# Altium footprint library Miscellaneous Connectors.PcbLib: 245 footprints (part 4 of 16)
Each footprint in its own frame and in the unit in brackets; x right, y up, seen from the top. Pads: shape width x height; smd on the part's side, far side on the other; paste and mask are expansions set on the pad; w line width, h text height; cw(c..) or ccw(c..) is an arc to the next point about the centre after c.
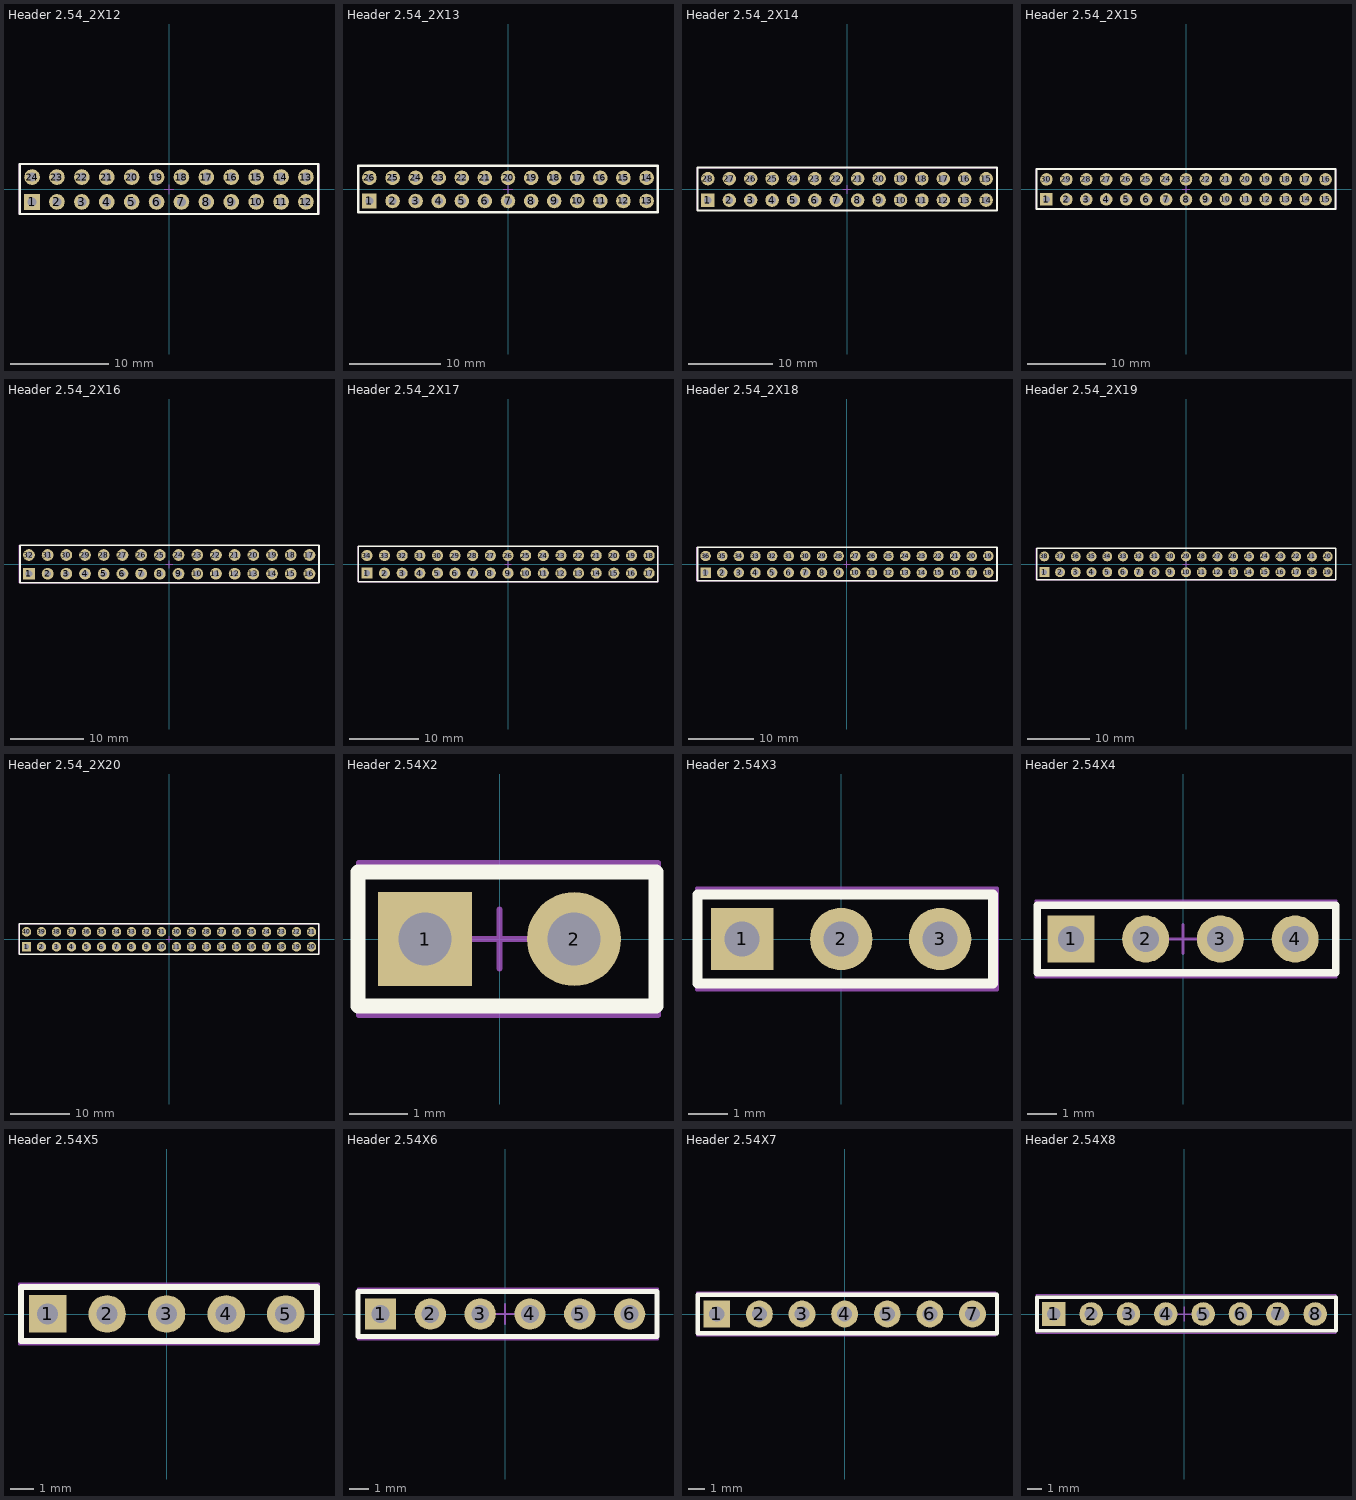
[diagram p3: the footprints below, top view; thin cyan lines are the x and y axes]

## Header 2.54_2X12 [mm]
pads (24):
  rect 1.6x1.6 hole 0.9: 1(-13.97,-1.27)
  round 1.6 hole 0.9: 2(-11.43,-1.27) 3(-8.89,-1.27) 4(-6.35,-1.27) 5(-3.81,-1.27) 6(-1.27,-1.27) 7(1.27,-1.27) 8(3.81,-1.27) 9(6.35,-1.27) 10(8.89,-1.27) 11(11.43,-1.27) 12(13.97,-1.27) 13(13.97,1.27) 14(11.43,1.27) 15(8.89,1.27) 16(6.35,1.27) 17(3.81,1.27) 18(1.27,1.27) 19(-1.27,1.27) 20(-3.81,1.27) 21(-6.35,1.27) 22(-8.89,1.27) 23(-11.43,1.27) 24(-13.97,1.27)
Top Overlay:
  lines w0.254: -15.2,-2.5 -15.2,2.6 15.23,2.6 15.23,-2.5 -15.2,-2.5
Mechanical 15:
  lines w0.1: -0.5,0 0.5,0 ; 0,-0.5 0,0.5 ; -15.3,-2.5 -15.3,2.6 15.3,2.6 15.3,-2.5 -15.3,-2.5
3D body: height 8.6, standoff -2.9, extent -15.24,-2.5 15.24,2.58

## Header 2.54_2X13 [mm]
pads (26):
  rect 1.6x1.6 hole 0.9: 1(-15.24,-1.27)
  round 1.6 hole 0.9: 2(-12.7,-1.27) 3(-10.16,-1.27) 4(-7.62,-1.27) 5(-5.08,-1.27) 6(-2.54,-1.27) 7(0,-1.27) 8(2.54,-1.27) 9(5.08,-1.27) 10(7.62,-1.27) 11(10.16,-1.27) 12(12.7,-1.27) 13(15.24,-1.27) 14(15.24,1.27) 15(12.7,1.27) 16(10.16,1.27) 17(7.62,1.27) 18(5.08,1.27) 19(2.54,1.27) 20(0,1.27) 21(-2.54,1.27) 22(-5.08,1.27) 23(-7.62,1.27) 24(-10.16,1.27) 25(-12.7,1.27) 26(-15.24,1.27)
Top Overlay:
  lines w0.254: -16.47,-2.5 16.46,-2.5 16.46,2.6 -16.47,2.6 -16.47,-2.5
Mechanical 15:
  lines w0.1: -0.5,0 0.5,0 ; 0,-0.5 0,0.5 ; -16.5,-2.5 16.5,-2.5 16.5,2.6 -16.5,2.6 -16.5,-2.5
3D body: height 8.6, standoff -2.9, extent -16.51,-2.5 16.51,2.58

## Header 2.54_2X14 [mm]
pads (28):
  rect 1.6x1.6 hole 0.9: 1(-16.51,-1.27)
  round 1.6 hole 0.9: 2(-13.97,-1.27) 3(-11.43,-1.27) 4(-8.89,-1.27) 5(-6.35,-1.27) 6(-3.81,-1.27) 7(-1.27,-1.27) 8(1.27,-1.27) 9(3.81,-1.27) 10(6.35,-1.27) 11(8.89,-1.27) 12(11.43,-1.27) 13(13.97,-1.27) 14(16.51,-1.27) 15(16.51,1.27) 16(13.97,1.27) 17(11.43,1.27) 18(8.89,1.27) 19(6.35,1.27) 20(3.81,1.27) 21(1.27,1.27) 22(-1.27,1.27) 23(-3.81,1.27) 24(-6.35,1.27) 25(-8.89,1.27) 26(-11.43,1.27) 27(-13.97,1.27) 28(-16.51,1.27)
Top Overlay:
  lines w0.254: -17.74,-2.5 -17.74,2.6 17.79,2.6 17.79,-2.5 -17.74,-2.5
Mechanical 15:
  lines w0.1: -0.5,0 0.5,0 ; 0,-0.5 0,0.5 ; -17.8,-2.5 -17.8,2.6 17.8,2.6 17.8,-2.5 -17.8,-2.5
3D body: height 8.6, standoff -2.9, extent -17.78,-2.5 17.78,2.58

## Header 2.54_2X15 [mm]
pads (30):
  rect 1.6x1.6 hole 0.9: 1(-17.78,-1.27)
  round 1.6 hole 0.9: 2(-15.24,-1.27) 3(-12.7,-1.27) 4(-10.16,-1.27) 5(-7.62,-1.27) 6(-5.08,-1.27) 7(-2.54,-1.27) 8(0,-1.27) 9(2.54,-1.27) 10(5.08,-1.27) 11(7.62,-1.27) 12(10.16,-1.27) 13(12.7,-1.27) 14(15.24,-1.27) 15(17.78,-1.27) 16(17.78,1.27) 17(15.24,1.27) 18(12.7,1.27) 19(10.16,1.27) 20(7.62,1.27) 21(5.08,1.27) 22(2.54,1.27) 23(0,1.27) 24(-2.54,1.27) 25(-5.08,1.27) 26(-7.62,1.27) 27(-10.16,1.27) 28(-12.7,1.27) 29(-15.24,1.27) 30(-17.78,1.27)
Top Overlay:
  lines w0.254: -19.01,-2.5 -19.01,2.6 19.02,2.6 19.02,-2.5 -19.01,-2.5
Mechanical 15:
  lines w0.1: -0.5,0 0.5,0 ; 0,-0.5 0,0.5 ; -19.1,-2.5 -19.1,2.6 19.1,2.6 19.1,-2.5 -19.1,-2.5
3D body: height 8.6, standoff -2.9, extent -19.05,-2.5 19.05,2.58

## Header 2.54_2X16 [mm]
pads (32):
  rect 1.6x1.6 hole 0.9: 1(-19.05,-1.27)
  round 1.6 hole 0.9: 2(-16.51,-1.27) 3(-13.97,-1.27) 4(-11.43,-1.27) 5(-8.89,-1.27) 6(-6.35,-1.27) 7(-3.81,-1.27) 8(-1.27,-1.27) 9(1.27,-1.27) 10(3.81,-1.27) 11(6.35,-1.27) 12(8.89,-1.27) 13(11.43,-1.27) 14(13.97,-1.27) 15(16.51,-1.27) 16(19.05,-1.27) 17(19.05,1.27) 18(16.51,1.27) 19(13.97,1.27) 20(11.43,1.27) 21(8.89,1.27) 22(6.35,1.27) 23(3.81,1.27) 24(1.27,1.27) 25(-1.27,1.27) 26(-3.81,1.27) 27(-6.35,1.27) 28(-8.89,1.27) 29(-11.43,1.27) 30(-13.97,1.27) 31(-16.51,1.27) 32(-19.05,1.27)
Top Overlay:
  lines w0.254: -20.28,-2.5 -20.28,2.6 20.35,2.6 20.35,-2.5 -20.28,-2.5
Mechanical 15:
  lines w0.1: -0.5,0 0.5,0 ; 0,-0.5 0,0.5 ; -20.4,-2.5 -20.4,2.6 20.3,2.6 20.3,-2.5 -20.4,-2.5
3D body: height 8.6, standoff -2.9, extent -20.32,-2.5 20.32,2.58

## Header 2.54_2X17 [mm]
pads (34):
  rect 1.6x1.6 hole 0.9: 1(-20.32,-1.27)
  round 1.6 hole 0.9: 2(-17.78,-1.27) 3(-15.24,-1.27) 4(-12.7,-1.27) 5(-10.16,-1.27) 6(-7.62,-1.27) 7(-5.08,-1.27) 8(-2.54,-1.27) 9(0,-1.27) 10(2.54,-1.27) 11(5.08,-1.27) 12(7.62,-1.27) 13(10.16,-1.27) 14(12.7,-1.27) 15(15.24,-1.27) 16(17.78,-1.27) 17(20.32,-1.27) 18(20.32,1.27) 19(17.78,1.27) 20(15.24,1.27) 21(12.7,1.27) 22(10.16,1.27) 23(7.62,1.27) 24(5.08,1.27) 25(2.54,1.27) 26(0,1.27) 27(-2.54,1.27) 28(-5.08,1.27) 29(-7.62,1.27) 30(-10.16,1.27) 31(-12.7,1.27) 32(-15.24,1.27) 33(-17.78,1.27) 34(-20.32,1.27)
Top Overlay:
  lines w0.254: -21.55,-2.5 21.58,-2.5 21.58,2.6 -21.55,2.6 -21.55,-2.5
Mechanical 15:
  lines w0.1: -0.5,0 0.5,0 ; 0,-0.5 0,0.5 ; -21.6,-2.5 21.6,-2.5 21.6,2.6 -21.6,2.6 -21.6,-2.5
3D body: height 8.6, standoff -2.9, extent -21.59,-2.5 21.59,2.58

## Header 2.54_2X18 [mm]
pads (36):
  rect 1.6x1.6 hole 0.9: 1(-21.59,-1.27)
  round 1.6 hole 0.9: 2(-19.05,-1.27) 3(-16.51,-1.27) 4(-13.97,-1.27) 5(-11.43,-1.27) 6(-8.89,-1.27) 7(-6.35,-1.27) 8(-3.81,-1.27) 9(-1.27,-1.27) 10(1.27,-1.27) 11(3.81,-1.27) 12(6.35,-1.27) 13(8.89,-1.27) 14(11.43,-1.27) 15(13.97,-1.27) 16(16.51,-1.27) 17(19.05,-1.27) 18(21.59,-1.27) 19(21.59,1.27) 20(19.05,1.27) 21(16.51,1.27) 22(13.97,1.27) 23(11.43,1.27) 24(8.89,1.27) 25(6.35,1.27) 26(3.81,1.27) 27(1.27,1.27) 28(-1.27,1.27) 29(-3.81,1.27) 30(-6.35,1.27) 31(-8.89,1.27) 32(-11.43,1.27) 33(-13.97,1.27) 34(-16.51,1.27) 35(-19.05,1.27) 36(-21.59,1.27)
Top Overlay:
  lines w0.254: -22.82,-2.5 -22.82,2.6 22.91,2.6 22.91,-2.5 -22.82,-2.5
Mechanical 15:
  lines w0.1: -0.5,0 0.5,0 ; 0,-0.5 0,0.5 ; -22.9,-2.5 -22.9,2.6 22.9,2.6 22.9,-2.5 -22.9,-2.5
3D body: height 8.6, standoff -2.9, extent -22.86,-2.5 22.86,2.58

## Header 2.54_2X19 [mm]
pads (38):
  rect 1.6x1.6 hole 0.9: 1(-22.86,-1.27)
  round 1.6 hole 0.9: 2(-20.32,-1.27) 3(-17.78,-1.27) 4(-15.24,-1.27) 5(-12.7,-1.27) 6(-10.16,-1.27) 7(-7.62,-1.27) 8(-5.08,-1.27) 9(-2.54,-1.27) 10(0,-1.27) 11(2.54,-1.27) 12(5.08,-1.27) 13(7.62,-1.27) 14(10.16,-1.27) 15(12.7,-1.27) 16(15.24,-1.27) 17(17.78,-1.27) 18(20.32,-1.27) 19(22.86,-1.27) 20(22.86,1.27) 21(20.32,1.27) 22(17.78,1.27) 23(15.24,1.27) 24(12.7,1.27) 25(10.16,1.27) 26(7.62,1.27) 27(5.08,1.27) 28(2.54,1.27) 29(0,1.27) 30(-2.54,1.27) 31(-5.08,1.27) 32(-7.62,1.27) 33(-10.16,1.27) 34(-12.7,1.27) 35(-15.24,1.27) 36(-17.78,1.27) 37(-20.32,1.27) 38(-22.86,1.27)
Top Overlay:
  lines w0.254: -24.09,-2.5 -24.09,2.6 24.14,2.6 24.14,-2.5 -24.09,-2.5
Mechanical 15:
  lines w0.1: -0.5,0 0.5,0 ; 0,-0.5 0,0.5 ; -24.2,-2.5 -24.2,2.6 24.2,2.6 24.2,-2.5 -24.2,-2.5
3D body: height 8.6, standoff -2.9, extent -24.13,-2.5 24.13,2.58

## Header 2.54_2X20 [mm]
pads (40):
  rect 1.6x1.6 hole 0.9: 1(-24.13,-1.27)
  round 1.6 hole 0.9: 2(-21.59,-1.27) 3(-19.05,-1.27) 4(-16.51,-1.27) 5(-13.97,-1.27) 6(-11.43,-1.27) 7(-8.89,-1.27) 8(-6.35,-1.27) 9(-3.81,-1.27) 10(-1.27,-1.27) 11(1.27,-1.27) 12(3.81,-1.27) 13(6.35,-1.27) 14(8.89,-1.27) 15(11.43,-1.27) 16(13.97,-1.27) 17(16.51,-1.27) 18(19.05,-1.27) 19(21.59,-1.27) 20(24.13,-1.27) 21(24.13,1.27) 22(21.59,1.27) 23(19.05,1.27) 24(16.51,1.27) 25(13.97,1.27) 26(11.43,1.27) 27(8.89,1.27) 28(6.35,1.27) 29(3.81,1.27) 30(1.27,1.27) 31(-1.27,1.27) 32(-3.81,1.27) 33(-6.35,1.27) 34(-8.89,1.27) 35(-11.43,1.27) 36(-13.97,1.27) 37(-16.51,1.27) 38(-19.05,1.27) 39(-21.59,1.27) 40(-24.13,1.27)
Top Overlay:
  lines w0.254: -25.36,-2.5 -25.36,2.6 25.37,2.6 25.37,-2.5 -25.36,-2.5
Mechanical 15:
  lines w0.1: -0.5,0 0.5,0 ; 0,-0.5 0,0.5 ; -25.4,-2.5 -25.4,2.6 25.4,2.6 25.4,-2.5 -25.4,-2.5
3D body: height 8.6, standoff -2.9, extent -25.4,-2.5 25.4,2.58

## Header 2.54X2 [mm]
pads (2):
  rect 1.6x1.6 hole 0.9: 1(-1.27,0)
  round 1.6 hole 0.9: 2(1.27,0)
Top Overlay:
  lines w0.254: -2.413,-1.143 2.667,-1.143 2.667,1.143 -2.413,1.143 -2.413,-1.143
Mechanical 15:
  lines w0.1: -0.5,0 0.5,0 ; 0,-0.5 0,0.5 ; -2.4,-1.3 2.7,-1.3 2.7,1.3 -2.4,1.3 -2.4,-1.3
3D body: height 8.3, standoff -2.9, extent -2.413,-1.228 2.667,1.27

## Header 2.54X3 [mm]
pads (3):
  rect 1.6x1.6 hole 0.9: 1(-2.54,0)
  round 1.6 hole 0.9: 2(0,0) 3(2.54,0)
Top Overlay:
  lines w0.254: -3.683,-1.143 3.9,-1.143 3.9,1.143 -3.683,1.143 -3.683,-1.143
Mechanical 15:
  lines w0.1: -3.7,-1.3 4,-1.3 4,1.3 -3.7,1.3 -3.7,-1.3
3D body: height 8.3, standoff -2.9, extent -3.683,-1.228 3.937,1.27

## Header 2.54X4 [mm]
pads (4):
  rect 1.6x1.6 hole 0.9: 1(-3.81,0)
  round 1.6 hole 0.9: 2(-1.27,0) 3(1.27,0) 4(3.81,0)
Top Overlay:
  lines w0.254: -4.953,-1.143 -4.953,1.143 5.19,1.143 5.19,-1.143 -4.953,-1.143
Mechanical 15:
  lines w0.1: -0.5,0 0.5,0 ; 0,-0.5 0,0.5 ; -5,-1.3 -5,1.3 5.2,1.3 5.2,-1.3 -5,-1.3
3D body: height 8.3, standoff -2.9, extent -4.953,-1.228 5.207,1.27

## Header 2.54X5 [mm]
pads (5):
  rect 1.6x1.6 hole 0.9: 1(-5.08,0)
  round 1.6 hole 0.9: 2(-2.54,0) 3(0,0) 4(2.54,0) 5(5.08,0)
Top Overlay:
  lines w0.254: -6.223,-1.143 6.42,-1.143 6.42,1.143 -6.223,1.143 -6.223,-1.143
Mechanical 15:
  lines w0.1: -6.3,-1.3 6.5,-1.3 6.5,1.3 -6.3,1.3 -6.3,-1.3
3D body: height 8.3, standoff -2.9, extent -6.223,-1.228 6.477,1.27

## Header 2.54X6 [mm]
pads (6):
  rect 1.6x1.6 hole 0.9: 1(-6.35,0)
  round 1.6 hole 0.9: 2(-3.81,0) 3(-1.27,0) 4(1.27,0) 5(3.81,0) 6(6.35,0)
Top Overlay:
  lines w0.254: -7.493,-1.143 7.75,-1.143 7.75,1.143 -7.493,1.143 -7.493,-1.143
Mechanical 15:
  lines w0.1: -0.5,0 0.5,0 ; 0,-0.5 0,0.5 ; -7.5,-1.3 7.8,-1.3 7.8,1.3 -7.5,1.3 -7.5,-1.3
3D body: height 8.3, standoff -2.9, extent -7.493,-1.228 7.747,1.27

## Header 2.54X7 [mm]
pads (7):
  rect 1.6x1.6 hole 0.9: 1(-7.62,0)
  round 1.6 hole 0.9: 2(-5.08,0) 3(-2.54,0) 4(0,0) 5(2.54,0) 6(5.08,0) 7(7.62,0)
Top Overlay:
  lines w0.254: -8.763,-1.143 9.08,-1.143 9.08,1.143 -8.763,1.143 -8.763,-1.143
Mechanical 15:
  lines w0.1: -8.8,-1.3 9,-1.3 9,1.3 -8.8,1.3 -8.8,-1.3
3D body: height 8.3, standoff -2.9, extent -8.763,-1.228 9.017,1.27

## Header 2.54X8 [mm]
pads (8):
  rect 1.6x1.6 hole 0.9: 1(-8.89,0)
  round 1.6 hole 0.9: 2(-6.35,0) 3(-3.81,0) 4(-1.27,0) 5(1.27,0) 6(3.81,0) 7(6.35,0) 8(8.89,0)
Top Overlay:
  lines w0.254: -10.033,-1.143 -10.033,1.143 10.31,1.143 10.31,-1.143 -10.033,-1.143
Mechanical 15:
  lines w0.1: -0.5,0 0.5,0 ; 0,-0.5 0,0.5 ; -10.1,-1.3 -10.1,1.3 10.3,1.3 10.3,-1.3 -10.1,-1.3
3D body: height 8.3, standoff -2.9, extent -10.033,-1.228 10.287,1.27